# Altium footprint library 3.01-按键按钮.PcbLib: 70 footprints (part 1 of 5)
Each footprint in its own frame and in the unit in brackets; x right, y up, seen from the top. Pads: shape width x height; smd on the part's side, far side on the other; paste and mask are expansions set on the pad; w line width, h text height; cw(c..) or ccw(c..) is an arc to the next point about the centre after c.
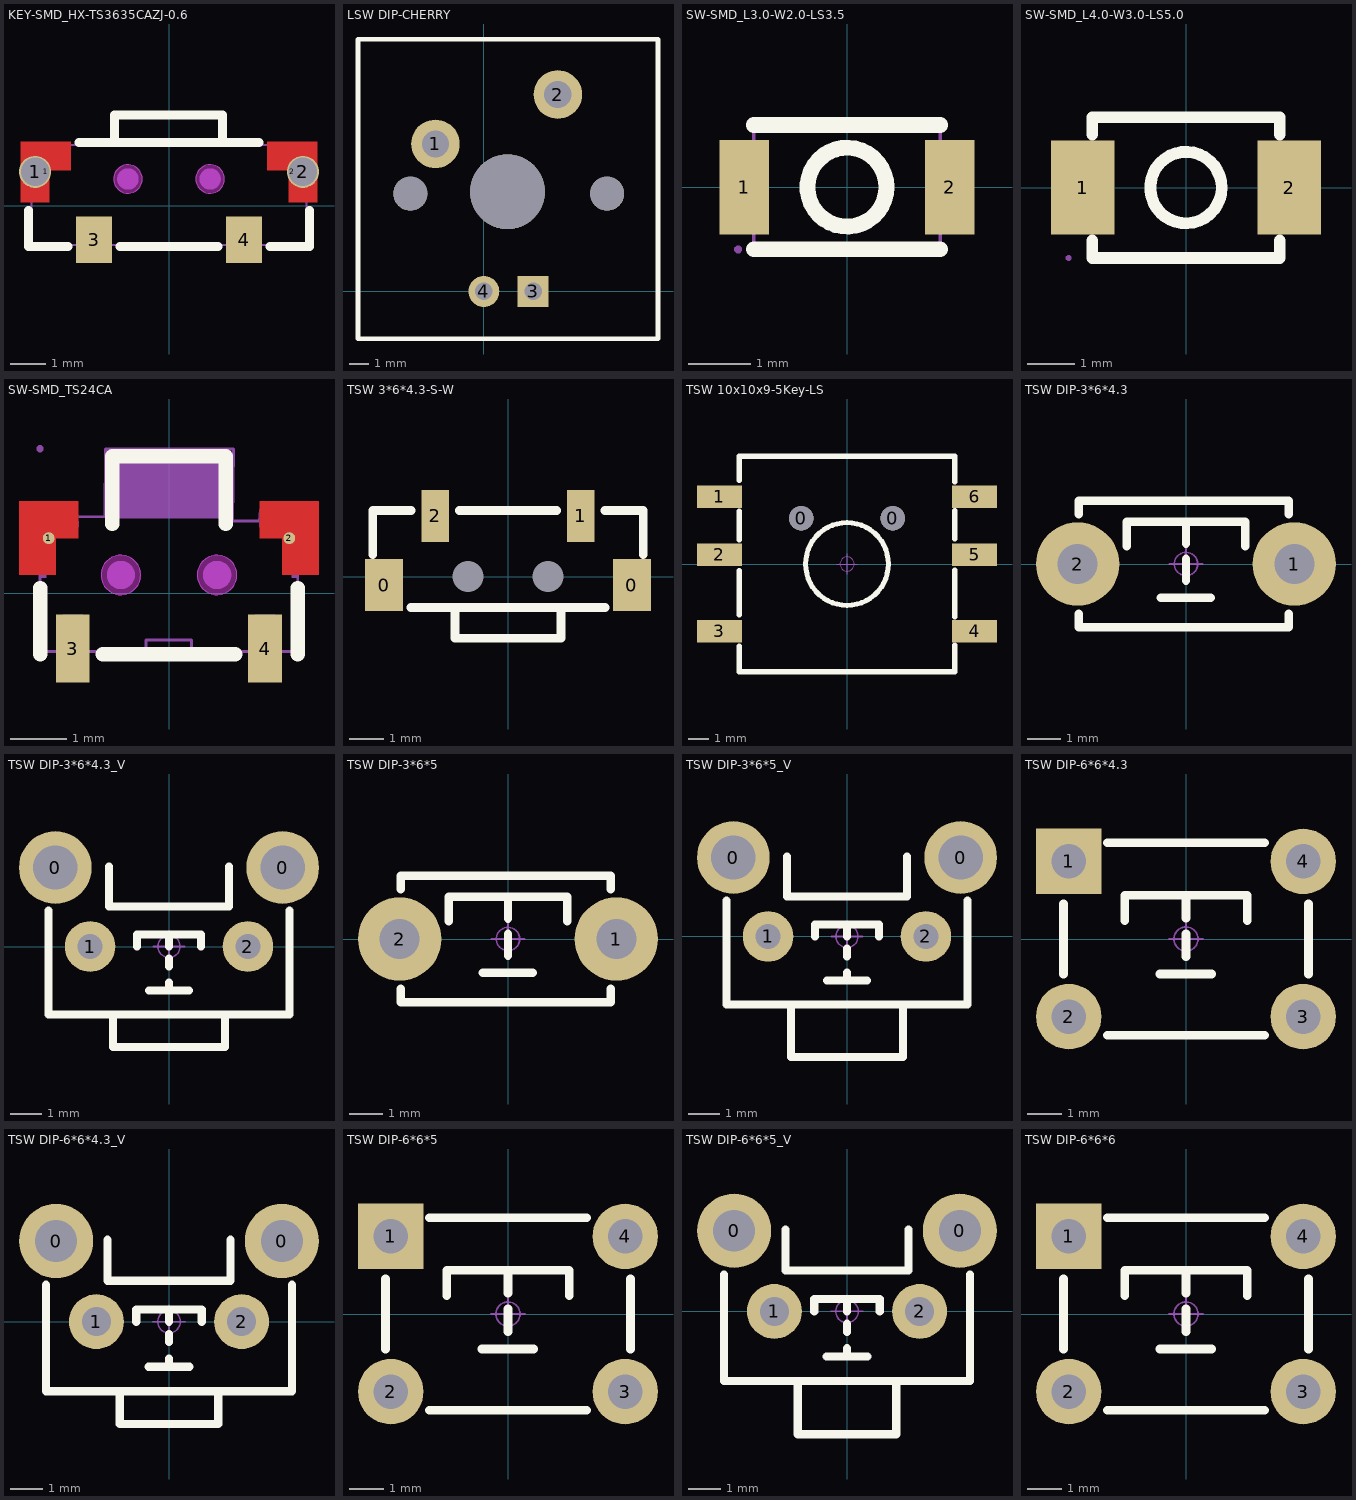
[diagram p0: the footprints below, top view; thin cyan lines are the x and y axes]

## KEY-SMD_HX-TS3635CAZJ-0.6 [mm]
pads (6):
  round 0.9 hole 0.8 paste+0 mask+0.05: 1(-3.75,0.95) 2(3.75,0.95)
  round 0.28 smd: 1(-3.45,0.95) 2(3.45,0.95)
  rect 1x1.3 smd paste+0 mask+0.051: 3(-2.1,-0.95) 4(2.1,-0.95)
Top Layer:
  region: -2.75,1 -2.75,1.8 -4.15,1.8 -4.15,0.1 -3.35,0.1 -3.35,1
  region: 2.75,1 2.75,1.8 4.15,1.8 4.15,0.1 3.35,0.1 3.35,1
Top Overlay:
  lines w0.254: -3.937,-0.131 -3.937,-1.143 -2.831,-1.143 ; -2.519,1.778 2.519,1.778 ; -1.524,1.778 -1.524,2.54 ; -1.5,2.54 1.5,2.54 1.5,1.778 ; -1.369,-1.143 1.369,-1.143 ; 2.831,-1.143 3.937,-1.143 3.937,-0.131
Keep-Out Layer:
  board cut-out: -0.75,0.75 -0.75,0.67 -0.811,0.523 -0.923,0.411 -1.07,0.35 -1.229,0.35 -1.376,0.411 -1.489,0.523 -1.55,0.67 -1.55,0.75 -1.55,0.83 -1.489,0.977 -1.376,1.089 -1.229,1.15 -1.07,1.15 -0.923,1.089 -0.811,0.977 -0.75,0.83 -0.75,0.75
  board cut-out: 1.55,0.75 1.55,0.67 1.489,0.523 1.377,0.411 1.23,0.35 1.071,0.35 0.924,0.411 0.811,0.523 0.75,0.67 0.75,0.75 0.75,0.83 0.811,0.977 0.924,1.089 1.071,1.15 1.23,1.15 1.377,1.089 1.489,0.977 1.55,0.83 1.55,0.75
Keep-Out Layer:
  circle w0.005: c-1.15,0.75 r0.4
  circle w0.005: c1.15,0.75 r0.4
  region: -0.75,0.75 -0.75,0.67 -0.811,0.523 -0.923,0.411 -1.07,0.35 -1.229,0.35 -1.376,0.411 -1.489,0.523 -1.55,0.67 -1.55,0.75 -1.55,0.83 -1.489,0.977 -1.376,1.089 -1.229,1.15 -1.07,1.15 -0.923,1.089 -0.811,0.977 -0.75,0.83 -0.75,0.75
  region: 1.55,0.75 1.55,0.67 1.489,0.523 1.377,0.411 1.23,0.35 1.071,0.35 0.924,0.411 0.811,0.523 0.75,0.67 0.75,0.75 0.75,0.83 0.811,0.977 0.924,1.089 1.071,1.15 1.23,1.15 1.377,1.089 1.489,0.977 1.55,0.83 1.55,0.75
Mechanical 1:
  circle w0.005: c-1.15,0.75 r0.4
  circle w0.005: c1.15,0.75 r0.4
Mechanical 6:
  circle w0.3: c-1.15,0.75 r0.15
  circle w0.3: c1.15,0.75 r0.15
Mechanical 15:
  region: 3,1.5 3,1.7 3.85,1.7 3.85,0.8 3.6,0.8 3.6,1.5
  region: -3,1.5 -3,1.7 -3.85,1.7 -3.85,0.8 -3.6,0.8 -3.6,1.5
  region: -3.85,0.65 -3.85,1.25 -3.65,1.25 -3.65,0.65
  region: 3.65,0.65 3.65,1.25 3.85,1.25 3.85,0.65
  region: -2.4,-0.45 -1.8,-0.45 -1.8,-1.45 -2.4,-1.45
  region: 1.8,-0.45 2.4,-0.45 2.4,-1.45 1.8,-1.45
  region: -3.79,1.7 -3.79,1.675 -3.825,1.64 -3.875,1.64 -3.91,1.675 -3.91,1.7 -3.91,1.725 -3.875,1.76 -3.825,1.76 -3.79,1.725 -3.79,1.7
  lines w0.051: -3.85,-1.1 3.85,-1.1 3.85,1.7 -3.85,1.7 -3.85,-1.1
3D body "SW1~KEY-SMD_HX-TS3635CAZJ-0.6~KEY-SMD_HX-TS3635CAZJ-0.6~npTy.STEP": height 3.5, standoff -0.75, extent -3.925,-1.138 3.925,2.652

## LSW DIP-CHERRY [mm] "淘宝ID:黄晶宝石"
pads (7):
  round 2.5 hole 1.4: 1(-2.489,7.595) 2(3.81,10.135)
  rect 1.6x1.6 hole 0.9: 3(2.54,0)
  round 1.6 hole 0.9: 4(0,0)
  round 1.75 hole 1.75: ""(-3.785,5.029) ""(6.35,5.029)
  round 3.85 hole 3.85: ""(1.219,5.131)
Top Overlay:
  lines w0.254: -6.477,-2.438 8.966,-2.438 8.966,12.979 -6.477,12.979 -6.477,-2.438
3D body "凯?": height 3.45, standoff -15.75, extent -6.581,-2.669 9.019,12.931

## SW-SMD_L3.0-W2.0-LS3.5 [mm]
pads (2):
  rect 0.8x1.524 smd: 1(-1.65,0) 2(1.65,0)
Top Overlay:
  circle w0.254: c-0.001,0 r0.635
  lines w0.254: -1.501,-1 1.499,-1 ; -1.501,1 1.499,1
Mechanical 15:
  region: -1.69,-1 -1.69,-1.025 -1.725,-1.06 -1.775,-1.06 -1.81,-1.025 -1.81,-1 -1.81,-0.975 -1.775,-0.94 -1.725,-0.94 -1.69,-0.975 -1.69,-1
  region: 1.45,0.65 1.75,0.65 1.75,-0.65 1.45,-0.65
  region: -1.75,0.65 -1.45,0.65 -1.45,-0.65 -1.75,-0.65
  lines w0.051: -1.5,-1 -1.5,1 1.5,1 1.5,-1 -1.5,-1
3D body "SW1~SW-SMD_L3.0-W2.0-LS3.5~SW-SMD_L3.0-W2.0-LS3.5~eBiL.STEP": height 0.67, standoff 0, extent -1.75,-1 1.75,1

## SW-SMD_L4.0-W3.0-LS5.0 [mm]
pads (2):
  rect 1.35x2 smd: 1(-2.2,0) 2(2.2,0)
Top Overlay:
  circle w0.254: c0,0 r0.762
  lines w0.254: -2,-1.131 -2,-1.5 2,-1.5 2,-1.131 ; -2,1.131 -2,1.5 2,1.5 2,1.131
Mechanical 15:
  region: -2.443,-1.5 -2.443,-1.475 -2.478,-1.44 -2.528,-1.44 -2.563,-1.475 -2.563,-1.5 -2.563,-1.525 -2.528,-1.56 -2.478,-1.56 -2.443,-1.525 -2.443,-1.5
  region: -2.503,0.65 -1.803,0.65 -1.803,-0.65 -2.503,-0.65
  region: 1.803,0.65 2.503,0.65 2.503,-0.65 1.803,-0.65
  lines w0.051: -2,-1.5 2,-1.5 2,1.5 -2,1.5 -2,-1.5
3D body "sw-03-25.STEP": height 2.01, standoff 0.01, extent -2.497,-1.5 2.503,1.5

## SW-SMD_TS24CA [mm] "2.3*4.7 侧贴"
pads (4):
  round 0.21 smd: 1(-2.125,0.975) 2(2.125,0.975)
  rect 0.6x1.2 smd: 3(-1.7,-0.975) 4(1.7,-0.975)
Top Layer:
  region: -1.6,0.975 -1.6,1.625 -2.65,1.625 -2.65,0.325 -2,0.325 -2,0.975 -1.6,0.975
  region: 2.65,0.325 2.65,1.625 1.6,1.625 1.6,0.975 2,0.975 2,0.325
Top Overlay:
  lines w0.254: -2.277,-1.075 -2.277,0.094 ; -1.169,-1.075 -0.889,-1.075 0.889,-1.075 1.169,-1.075 ; -1,1.225 -1,2.425 1,2.425 1,1.225 ; 2.275,-1.075 2.275,0.094
Keep-Out Layer:
  board cut-out: 1.2,0.325 1.2,0.255 1.147,0.127 1.048,0.028 0.92,-0.025 0.78,-0.025 0.652,0.028 0.553,0.127 0.5,0.255 0.5,0.325 0.5,0.395 0.553,0.523 0.652,0.622 0.78,0.675 0.92,0.675 1.048,0.622 1.147,0.523 1.2,0.395 1.2,0.325
  board cut-out: -0.5,0.325 -0.5,0.255 -0.553,0.127 -0.652,0.028 -0.78,-0.025 -0.92,-0.025 -1.048,0.028 -1.147,0.127 -1.2,0.255 -1.2,0.325 -1.2,0.395 -1.147,0.523 -1.048,0.622 -0.92,0.675 -0.78,0.675 -0.652,0.622 -0.553,0.523 -0.5,0.395 -0.5,0.325
Keep-Out Layer:
  circle w0.005: c0.85,0.325 r0.35
  circle w0.005: c-0.85,0.325 r0.35
  region: 1.2,0.325 1.2,0.255 1.147,0.127 1.048,0.028 0.92,-0.025 0.78,-0.025 0.652,0.028 0.553,0.127 0.5,0.255 0.5,0.325 0.5,0.395 0.553,0.523 0.652,0.622 0.78,0.675 0.92,0.675 1.048,0.622 1.147,0.523 1.2,0.395 1.2,0.325
  region: -0.5,0.325 -0.5,0.255 -0.553,0.127 -0.652,0.028 -0.78,-0.025 -0.92,-0.025 -1.048,0.028 -1.147,0.127 -1.2,0.255 -1.2,0.325 -1.2,0.395 -1.147,0.523 -1.048,0.622 -0.92,0.675 -0.78,0.675 -0.652,0.622 -0.553,0.523 -0.5,0.395 -0.5,0.325
Mechanical 1:
  circle w0.005: c0.85,0.325 r0.35
  circle w0.005: c-0.85,0.325 r0.35
Mechanical 6:
  circle w0.25: c-0.85,0.325 r0.125
  circle w0.25: c0.85,0.325 r0.125
  region: -1.016,1.328 -1.016,2.471 1.016,2.471 1.016,1.328
Mechanical 15:
  region: -2.275,0.275 -2.275,1.275 -1.6,1.275 -1.6,1.165 -2.165,1.165 -2.165,0.275
  region: 2.275,0.275 2.275,1.275 1.6,1.275 1.6,1.165 2.165,1.165 2.165,0.275
  region: -1.525,-1.125 -1.875,-1.125 -1.875,-0.375 -1.525,-0.375
  region: 1.875,-1.125 1.525,-1.125 1.525,-0.375 1.875,-0.375
  region: -2.22,2.552 -2.22,2.527 -2.255,2.492 -2.305,2.492 -2.34,2.527 -2.34,2.552 -2.34,2.577 -2.305,2.612 -2.255,2.612 -2.22,2.577 -2.22,2.552
  lines w0.051: -0.407,-1.024 -0.406,-1.024 ; -0.406,-1.024 -1.506,-1.025 -1.506,-1.124 -1.904,-1.124 -1.905,-1.025 -2.275,-1.025 -2.28,1.351 -1.128,1.354 -1.124,2.552 1.138,2.552 1.127,1.278 1.595,1.275 1.615,1.475 1.876,1.476 1.897,1.277 2.275,1.274 2.274,-1.027 2.145,-1.024 1.895,-1.025 1.894,-1.125 1.495,-1.125 1.495,-1.025 0.395,-1.025 0.395,-0.825 -0.406,-0.824 -0.407,-1.024
3D body "SW1~SW-SMD_TS24CA~SW-SMD_TS24CA~4qAG.STEP": height 1.82, standoff -0.1, extent -2.317,-1.524 2.233,2.076

## TSW 3*6*4.3-S-W [mm] "侧立贴片3*6*4.3          淘宝ID:黄晶宝石"
pads (6):
  rect 1.1x1.5 smd: 0(-3.575,-0.25) 0(3.575,-0.25)
  round 0 hole 0.9: 0(-1.15,0) 0(1.15,0)
  rect 0.8x1.5 smd: 1(2.1,1.75) 2(-2.1,1.75)
Top Overlay:
  lines w0.254: -3.9,0.635 -3.9,1.9 -3.895,1.905 -2.794,1.905 ; -2.794,-0.889 2.794,-0.889 ; -1.524,-0.889 -1.524,-1.778 1.524,-1.778 1.524,-0.889 ; -1.397,1.905 1.397,1.905 ; 2.794,1.905 3.895,1.905 3.9,1.91 3.9,0.635
3D body "TSW 3x6x4.3-S-W.STEP": height 3.51, standoff -0.74, extent -3.9,-1.79 3.9,1.91

## TSW 10x10x9-5Key-LS [mm] "6脚，长：10.5，宽：10，高：9mm               淘宝ID:黄晶宝石"
pads (8):
  round 1.2 hole 1.2: 0(-2.25,2.25) 0(2.25,2.25)
  rect 2.2x1.1 smd: 1(-6.262,3.3) 2(-6.262,0.45) 3(-6.262,-3.3) 4(6.262,-3.3) 5(6.262,0.45) 6(6.262,3.3)
Top Overlay:
  circle w0.25: c0,0 r2.032
  lines w0.254: -5.287,-4.017 -5.287,-5.287 5.287,-5.287 5.287,-3.984 ; -5.287,-2.493 -5.287,-0.334 ; -5.287,1.19 -5.287,2.587 ; -5.287,4.111 -5.287,5.287 5.287,5.287 5.287,4.017 ; 5.287,-2.587 5.287,-0.301 ; 5.287,1.223 5.287,2.62
Mechanical 15:
  circle w0.05: c0,0 r0.35
  lines w0.05: -0.5,0 0.5,0 ; 0,-0.5 0,0.5
3D body "TSW 10x10x9-5Key-LS.STEP": height 9.05, standoff -0.65, extent -6.5,-5.16 6.5,5.16

## TSW DIP-3*6*4.3 [mm] "3*6*4.3mm           淘宝ID:黄晶宝石"
pads (2):
  round 2.5 hole 1.2: 1(3.25,0) 2(-3.25,0)
Top Overlay:
  lines w0.254: -3.212,-1.499 -3.212,-1.9 3.088,-1.9 3.088,-1.499 ; -3.212,1.499 -3.212,1.9 3.088,1.9 3.088,1.499 ; -1.778,0.533 -1.778,1.27 1.778,1.27 1.778,0.533 ; -0.762,-1.016 0.737,-1.016 ; 0,-0.508 0,0.152 ; 0,0.61 0,1.27
Mechanical 15:
  circle w0.05: c0,0 r0.35
  lines w0.05: -0.5,0 0.5,0 ; 0,-0.5 0,0.5
3D body "TSW DIP-3x6x4.3.STEP": height 4.31, standoff -3.49, extent -3.914,-1.75 3.914,1.75

## TSW DIP-3*6*4.3_V [mm] "侧按轻触开关 3*6*4.3mm            淘宝ID:黄晶宝石"
pads (4):
  round 2.3 hole 1.4: 0(-3.6,2.5) 0(3.6,2.5)
  round 1.6 hole 0.8: 1(-2.5,0) 2(2.5,0)
Top Overlay:
  lines w0.254: -3.81,1.143 -3.81,-2.159 3.81,-2.159 3.81,1.143 ; -1.905,2.54 -1.905,1.27 1.905,1.27 1.905,2.54 ; -1.778,-2.159 -1.778,-3.175 1.778,-3.175 1.778,-2.159 ; -1.016,0 -1.016,0.381 1.016,0.381 1.016,0 ; -0.635,-1.397 0.635,-1.397 ; 0,-1.397 0,-1.143 ; 0,-0.635 0,-0.381 ; 0,0 0,0.381
Mechanical 15:
  circle w0.05: c0,0 r0.35
  lines w0.05: -0.5,0 0.5,0 ; 0,-0.5 0,0.5
3D body "TSW DIP-3x6x4.3_V.STEP": height 4.45, standoff -2.8, extent -3.996,-3.05 3.996,3.5

## TSW DIP-3*6*5 [mm] "3*6*5mm            淘宝ID:黄晶宝石"
pads (2):
  round 2.5 hole 1.2: 1(3.25,0) 2(-3.25,0)
Top Overlay:
  lines w0.254: -3.212,-1.499 -3.212,-1.9 3.088,-1.9 3.088,-1.499 ; -3.212,1.499 -3.212,1.9 3.088,1.9 3.088,1.499 ; -1.778,0.533 -1.778,1.27 1.778,1.27 1.778,0.533 ; -0.762,-1.016 0.737,-1.016 ; 0,-0.508 0,0.152 ; 0,0.61 0,1.27
Mechanical 15:
  circle w0.05: c0,0 r0.35
  lines w0.05: -0.5,0 0.5,0 ; 0,-0.5 0,0.5
3D body "TSW DIP-3x6x5.STEP": height 5.01, standoff -3.49, extent -3.914,-1.75 3.914,1.75

## TSW DIP-3*6*5_V [mm] "侧按轻触开关 3*6*5mm"
pads (4):
  round 2.3 hole 1.4: 0(-3.6,2.5) 0(3.6,2.5)
  round 1.6 hole 0.8: 1(-2.5,0) 2(2.5,0)
Top Overlay:
  lines w0.254: -3.81,1.143 -3.81,-2.159 3.81,-2.159 3.81,1.143 ; -1.905,2.54 -1.905,1.27 1.905,1.27 1.905,2.54 ; -1.778,-2.159 -1.778,-3.81 1.778,-3.81 1.778,-2.159 ; -1.016,0 -1.016,0.381 1.016,0.381 1.016,0 ; -0.635,-1.397 0.635,-1.397 ; 0,-1.397 0,-1.143 ; 0,-0.635 0,-0.381 ; 0,0 0,0.381
Mechanical 15:
  circle w0.05: c0,0 r0.35
  lines w0.05: -0.5,0 0.5,0 ; 0,-0.5 0,0.5
3D body "TSW DIP-3x6x5_V.STEP": height 4.45, standoff -2.8, extent -3.996,-3.75 3.996,3.5

## TSW DIP-6*6*4.3 [mm] "6*6*4.3mm"
pads (4):
  rect 1.9x1.9 hole 1: 1(-3.4,2.25)
  round 1.9 hole 1: 2(-3.4,-2.25) 3(3.4,-2.25) 4(3.4,2.25)
Top Overlay:
  lines w0.254: -3.556,-1.016 -3.556,1.016 ; -2.286,-2.794 2.286,-2.794 ; -2.286,2.794 2.286,2.794 ; -1.778,0.533 -1.778,1.27 1.778,1.27 1.778,0.533 ; -0.762,-1.016 0.737,-1.016 ; 0,-0.508 0,0.152 ; 0,0.61 0,1.27 ; 3.556,-1.016 3.556,1.016
Bottom Overlay:
  lines w0.254: -2.286,-2.286 2.286,-2.286 ; -2.286,2.286 2.286,2.286
Mechanical 15:
  circle w0.05: c0,0 r0.35
  lines w0.05: -0.5,0 0.5,0 ; 0,-0.5 0,0.5
3D body "TSW DIP-6x6x4.3.STEP": height 4.25, standoff -3.45, extent -4.106,-3 4.106,3

## TSW DIP-6*6*4.3_V [mm] "侧按轻触开关 6*6*4.3mm"
pads (4):
  round 2.3 hole 1.3: 0(-3.5,2.5) 0(3.5,2.5)
  round 1.7 hole 0.9: 1(-2.25,0) 2(2.25,0)
Top Overlay:
  lines w0.254: -3.81,1.143 -3.81,-2.159 3.81,-2.159 3.81,1.143 ; -1.905,2.54 -1.905,1.27 1.905,1.27 1.905,2.54 ; -1.524,-2.159 -1.524,-3.175 1.524,-3.175 1.524,-2.159 ; -1.016,0 -1.016,0.381 1.016,0.381 1.016,0 ; -0.635,-1.397 0.635,-1.397 ; 0,-1.397 0,-1.143 ; 0,-0.635 0,-0.381 ; 0,0 0,0.381
Mechanical 15:
  circle w0.05: c0,0 r0.35
  lines w0.05: -0.5,0 0.5,0 ; 0,-0.5 0,0.5
3D body "TSW DIP-6x6x4.3_V.STEP": height 7.47, standoff -3.4, extent -4.183,-3.023 4.184,4.127

## TSW DIP-6*6*5 [mm] "6*6*5mm        淘宝ID:黄晶宝石"
pads (4):
  rect 1.9x1.9 hole 1: 1(-3.4,2.25)
  round 1.9 hole 1: 2(-3.4,-2.25) 3(3.4,-2.25) 4(3.4,2.25)
Top Overlay:
  lines w0.254: -3.556,-1.016 -3.556,1.016 ; -2.286,-2.794 2.286,-2.794 ; -2.286,2.794 2.286,2.794 ; -1.778,0.533 -1.778,1.27 1.778,1.27 1.778,0.533 ; -0.762,-1.016 0.737,-1.016 ; 0,-0.508 0,0.152 ; 0,0.61 0,1.27 ; 3.556,-1.016 3.556,1.016
Bottom Overlay:
  lines w0.254: -2.286,-2.286 2.286,-2.286 ; -2.286,2.286 2.286,2.286
Mechanical 15:
  circle w0.05: c0,0 r0.35
  lines w0.05: -0.5,0 0.5,0 ; 0,-0.5 0,0.5
3D body "TSW DIP-6x6x5.STEP": height 4.95, standoff -3.45, extent -4.106,-3 4.106,3

## TSW DIP-6*6*5_V [mm] "侧按轻触开关 6*6*5mm"
pads (4):
  round 2.3 hole 1.3: 0(-3.5,2.5) 0(3.5,2.5)
  round 1.7 hole 0.9: 1(-2.25,0) 2(2.25,0)
Top Overlay:
  lines w0.254: -3.81,1.143 -3.81,-2.159 3.81,-2.159 3.81,1.143 ; -1.905,2.54 -1.905,1.27 1.905,1.27 1.905,2.54 ; -1.524,-2.159 -1.524,-3.81 1.524,-3.81 1.524,-2.159 ; -1.016,0 -1.016,0.381 1.016,0.381 1.016,0 ; -0.635,-1.397 0.635,-1.397 ; 0,-1.397 0,-1.143 ; 0,-0.635 0,-0.381 ; 0,0 0,0.381
Mechanical 15:
  circle w0.05: c0,0 r0.35
  lines w0.05: -0.5,0 0.5,0 ; 0,-0.5 0,0.5
3D body "TSW DIP-6x6x5_V.STEP": height 7.47, standoff -3.4, extent -4.183,-3.723 4.184,4.127

## TSW DIP-6*6*6 [mm] "6*6*6mm"
pads (4):
  rect 1.9x1.9 hole 1: 1(-3.4,2.25)
  round 1.9 hole 1: 2(-3.4,-2.25) 3(3.4,-2.25) 4(3.4,2.25)
Top Overlay:
  lines w0.254: -3.556,-1.016 -3.556,1.016 ; -2.286,-2.794 2.286,-2.794 ; -2.286,2.794 2.286,2.794 ; -1.778,0.533 -1.778,1.27 1.778,1.27 1.778,0.533 ; -0.762,-1.016 0.737,-1.016 ; 0,-0.508 0,0.152 ; 0,0.61 0,1.27 ; 3.556,-1.016 3.556,1.016
Bottom Overlay:
  lines w0.254: -2.286,-2.286 2.286,-2.286 ; -2.286,2.286 2.286,2.286
Mechanical 15:
  circle w0.05: c0,0 r0.35
  lines w0.05: -0.5,0 0.5,0 ; 0,-0.5 0,0.5
3D body "TSW DIP-6x6x6.STEP": height 5.95, standoff -3.45, extent -4.106,-3 4.106,3